# Altium footprint library 2021-01-24_13-35-38.PcbLib: 3 footprints
Each footprint in its own frame and in the unit in brackets; x right, y up, seen from the top. Pads: shape width x height; smd on the part's side, far side on the other; paste and mask are expansions set on the pad; w line width, h text height; cw(c..) or ccw(c..) is an arc to the next point about the centre after c.
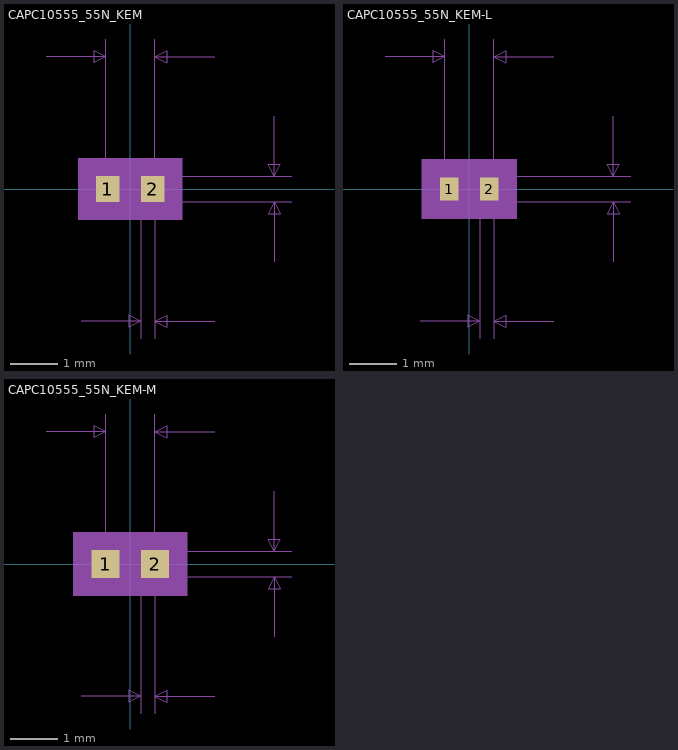
[diagram p0: the footprints below, top view; thin cyan lines are the x and y axes]

## CAPC10555_55N_KEM [mm]
pads (2):
  rect 0.503x0.55 smd paste+0 mask+0: 1(-0.477,0) 2(0.477,0)
Mechanical 5:
  region: 1.109,-0.656 -1.109,-0.656 -1.109,0.656 1.109,0.656
Mechanical 7:
  lines w0.025: -1.795,2.815 -0.525,2.815 ; -1.045,-2.815 0.225,-2.815 ; -0.525,0 -0.525,3.196 ; 0,-0.275 3.446,-0.275 ; 0,0.275 3.446,0.275 ; 0.225,-3.196 0.225,0 ; 0.525,-3.196 0.525,0 0.525,3.196 ; 1.795,-2.815 0.525,-2.815 ; 1.795,2.815 0.525,2.815 ; 3.065,-1.545 3.065,-0.275 ; 3.065,1.545 3.065,0.275 ; -0.525,2.815 -0.779,2.942 -0.779,2.688 -0.525,2.815 ; 0.225,-2.815 -0.029,-2.688 -0.029,-2.942 0.225,-2.815 ; 0.525,-2.815 0.779,-2.688 0.779,-2.942 0.525,-2.815 ; 0.525,2.815 0.779,2.942 0.779,2.688 0.525,2.815 ; 3.065,-0.275 2.938,-0.529 3.192,-0.529 3.065,-0.275 ; 3.065,0.275 2.938,0.529 3.192,0.529 3.065,0.275
  text "Default Padstyle: RX19p81Y21p65D0T" at -10.795,-7.133 h1.27
  text "Alternate 1 Padstyle: OX60Y90D30P" at -10.477,-9.673 h1.27
  text "Alternate 2 Padstyle: OX90Y60D30P" at -10.477,-12.213 h1.27
  text "0.022in/0.55mm" at 3.573,-0.318 h0.64
  text "0.041in/1.05mm" at -2.222,3.323 h0.64
  text "0.01in/0.25mm" at -1.689,-3.958 h0.64
Mechanical 13:
  lines w0.025: -0.525,-0.275 -0.525,0.275 ; -0.525,-0.275 -0.275,-0.275 -0.275,0.275 -0.525,0.275 ; -0.525,-0.275 0.525,-0.275 ; -0.525,-0.275 -0.525,0.275 ; -0.525,0.275 0.525,0.275 ; 0.525,-0.275 0.275,-0.275 0.275,0.275 0.525,0.275 ; 0.525,-0.275 0.525,0.275 ; 0.525,-0.275 0.525,0.275
Mechanical 15:
  region: 0.881,-0.427 -0.881,-0.427 -0.881,0.427 0.881,0.427
  lines w0.152: -0.881,-0.427 -0.881,0.427 0.881,0.427 0.881,-0.427 -0.881,-0.427
3D body: height 0.25, standoff 0, extent 0,0 0.254,0.254

## CAPC10555_55N_KEM-L [mm]
pads (2):
  rect 0.402x0.499 smd paste+0 mask+0: 1(-0.426,0) 2(0.426,0)
Mechanical 5:
  region: 1.008,-0.631 -1.008,-0.631 -1.008,0.631 1.008,0.631
Mechanical 7:
  lines w0.025: -1.795,2.815 -0.525,2.815 ; -1.045,-2.815 0.225,-2.815 ; -0.525,0 -0.525,3.196 ; 0,-0.275 3.446,-0.275 ; 0,0.275 3.446,0.275 ; 0.225,-3.196 0.225,0 ; 0.525,-3.196 0.525,0 0.525,3.196 ; 1.795,-2.815 0.525,-2.815 ; 1.795,2.815 0.525,2.815 ; 3.065,-1.545 3.065,-0.275 ; 3.065,1.545 3.065,0.275 ; -0.525,2.815 -0.779,2.942 -0.779,2.688 -0.525,2.815 ; 0.225,-2.815 -0.029,-2.688 -0.029,-2.942 0.225,-2.815 ; 0.525,-2.815 0.779,-2.688 0.779,-2.942 0.525,-2.815 ; 0.525,2.815 0.779,2.942 0.779,2.688 0.525,2.815 ; 3.065,-0.275 2.938,-0.529 3.192,-0.529 3.065,-0.275 ; 3.065,0.275 2.938,0.529 3.192,0.529 3.065,0.275
  text "Default Padstyle: RX15p81Y19p65D0T" at -10.795,-7.108 h1.27
  text "Alternate 1 Padstyle: OX60Y90D30P" at -10.477,-9.648 h1.27
  text "Alternate 2 Padstyle: OX90Y60D30P" at -10.477,-12.188 h1.27
  text "0.022in/0.55mm" at 3.573,-0.318 h0.64
  text "0.041in/1.05mm" at -2.222,3.323 h0.64
  text "0.01in/0.25mm" at -1.689,-3.958 h0.64
Mechanical 13:
  lines w0.025: -0.525,-0.275 -0.525,0.275 ; -0.525,-0.275 -0.275,-0.275 -0.275,0.275 -0.525,0.275 ; -0.525,-0.275 0.525,-0.275 ; -0.525,-0.275 -0.525,0.275 ; -0.525,0.275 0.525,0.275 ; 0.525,-0.275 0.275,-0.275 0.275,0.275 0.525,0.275 ; 0.525,-0.275 0.525,0.275 ; 0.525,-0.275 0.525,0.275
Mechanical 15:
  region: 0.728,-0.351 -0.728,-0.351 -0.728,0.351 0.728,0.351
  lines w0.152: -0.728,-0.351 -0.728,0.351 0.728,0.351 0.728,-0.351 -0.728,-0.351
3D body: height 0.25, standoff 0, extent 0,0 0.254,0.254

## CAPC10555_55N_KEM-M [mm]
pads (2):
  rect 0.605x0.601 smd paste+0 mask+0: 1(-0.527,0) 2(0.527,0)
Mechanical 5:
  region: 1.211,-0.681 -1.211,-0.681 -1.211,0.681 1.211,0.681
Mechanical 7:
  lines w0.025: -1.795,2.815 -0.525,2.815 ; -1.045,-2.815 0.225,-2.815 ; -0.525,0 -0.525,3.196 ; 0,-0.275 3.446,-0.275 ; 0,0.275 3.446,0.275 ; 0.225,-3.196 0.225,0 ; 0.525,-3.196 0.525,0 0.525,3.196 ; 1.795,-2.815 0.525,-2.815 ; 1.795,2.815 0.525,2.815 ; 3.065,-1.545 3.065,-0.275 ; 3.065,1.545 3.065,0.275 ; -0.525,2.815 -0.779,2.942 -0.779,2.688 -0.525,2.815 ; 0.225,-2.815 -0.029,-2.688 -0.029,-2.942 0.225,-2.815 ; 0.525,-2.815 0.779,-2.688 0.779,-2.942 0.525,-2.815 ; 0.525,2.815 0.779,2.942 0.779,2.688 0.525,2.815 ; 3.065,-0.275 2.938,-0.529 3.192,-0.529 3.065,-0.275 ; 3.065,0.275 2.938,0.529 3.192,0.529 3.065,0.275
  text "Default Padstyle: RX23p81Y23p65D0T" at -10.795,-7.158 h1.27
  text "Alternate 1 Padstyle: OX60Y90D30P" at -10.477,-9.698 h1.27
  text "Alternate 2 Padstyle: OX90Y60D30P" at -10.477,-12.238 h1.27
  text "0.022in/0.55mm" at 3.573,-0.318 h0.64
  text "0.041in/1.05mm" at -2.222,3.323 h0.64
  text "0.01in/0.25mm" at -1.689,-3.958 h0.64
Mechanical 13:
  lines w0.025: -0.525,-0.275 -0.525,0.275 ; -0.525,-0.275 -0.275,-0.275 -0.275,0.275 -0.525,0.275 ; -0.525,-0.275 0.525,-0.275 ; -0.525,-0.275 -0.525,0.275 ; -0.525,0.275 0.525,0.275 ; 0.525,-0.275 0.275,-0.275 0.275,0.275 0.525,0.275 ; 0.525,-0.275 0.525,0.275 ; 0.525,-0.275 0.525,0.275
Mechanical 15:
  region: 1.033,-0.504 -1.033,-0.504 -1.033,0.504 1.033,0.504
  lines w0.152: -1.033,-0.504 -1.033,0.504 1.033,0.504 1.033,-0.504 -1.033,-0.504
3D body: height 0.25, standoff 0, extent 0,0 0.254,0.254